# Altium footprint library ACB_PcbLib.PcbLib: 40 footprints (part 3 of 3)
Each footprint in its own frame and in the unit in brackets; x right, y up, seen from the top. Pads: shape width x height; smd on the part's side, far side on the other; paste and mask are expansions set on the pad; w line width, h text height; cw(c..) or ccw(c..) is an arc to the next point about the centre after c.
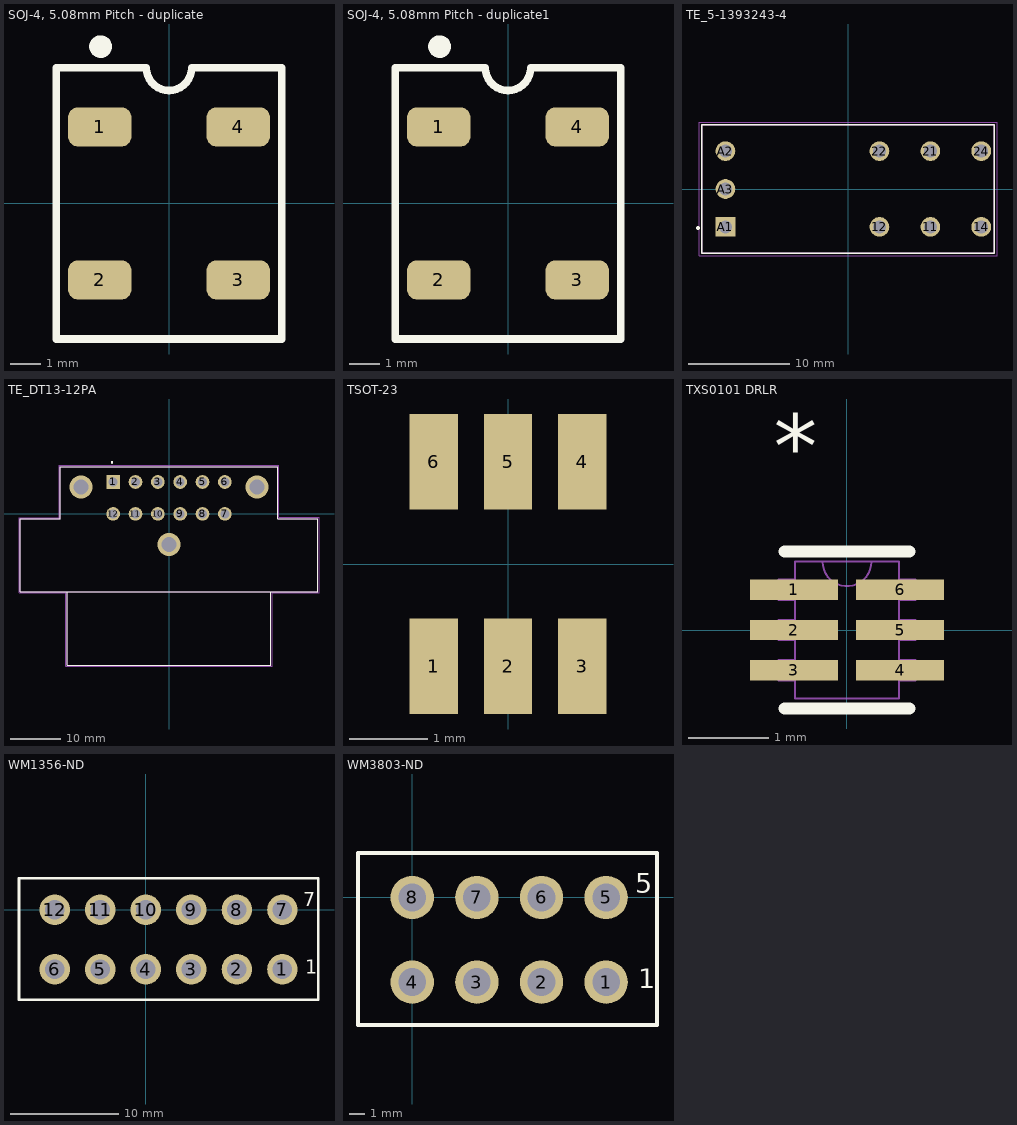
[diagram p2: the footprints below, top view; thin cyan lines are the x and y axes]

## SOJ-4, 5.08mm Pitch - duplicate [mm]
pads (4):
  rrect50% 2.1x1.3 smd: 1(-2.314,2.54) 2(-2.314,-2.54) 3(2.286,-2.54) 4(2.286,2.54)
Top Overlay:
  circle w0.254: c-2.286,5.207 r0.25
  region: -2.54,5.461 -2.54,4.961 -2.04,4.961 -2.04,5.461
  lines w0.25: -0.764,4.5 -3.764,4.5 -3.764,-4.5 3.736,-4.5 3.736,4.5 0.736,4.5
  lines w0.254: -0.764,4.5 ccw(c-0.014,4.5) 0.736,4.5

## SOJ-4, 5.08mm Pitch - duplicate1 [mm]
pads (4):
  rrect50% 2.1x1.3 smd: 1(-2.314,2.54) 2(-2.314,-2.54) 3(2.286,-2.54) 4(2.286,2.54)
Top Overlay:
  circle w0.254: c-2.286,5.207 r0.25
  region: -2.54,5.461 -2.54,4.961 -2.04,4.961 -2.04,5.461
  lines w0.25: -0.764,4.5 -3.764,4.5 -3.764,-4.5 3.736,-4.5 3.736,4.5 0.736,4.5
  lines w0.254: -0.764,4.5 ccw(c-0.014,4.5) 0.736,4.5

## TE_5-1393243-4 [mm]
pads (9):
  round 1.95 hole 1.3: 11(8.15,-3.75) 12(3.11,-3.75) 14(13.19,-3.75) 21(8.15,3.75) 22(3.11,3.75) 24(13.19,3.75) A2(-12.15,3.75) A3(-12.15,0)
  rect 1.95x1.95 hole 1.3: A1(-12.15,-3.75)
Top Overlay:
  circle w0.2: c-14.865,-3.87 r0.1
  lines w0.127: -14.5,-6.35 -14.5,6.35 14.5,6.35 14.5,-6.35 -14.5,-6.35
Mechanical 4:
  lines w0.127: -14.5,-6.35 -14.5,6.35 ; -14.5,-6.35 14.5,-6.35 ; -14.5,-6.35 -14.5,6.35 ; -14.5,-6.35 14.5,-6.35 ; -14.5,6.35 14.5,6.35 ; -14.5,6.35 14.5,6.35 ; 14.5,-6.35 14.5,6.35 ; 14.5,-6.35 14.5,6.35
Mechanical 16:
  lines w0.05: -14.75,-6.6 -14.75,6.6 14.75,6.6 14.75,-6.6 -14.75,-6.6
3D body: height 15.7, standoff 0, extent -14.5,-6.325 14.475,6.325

## TE_DT13-12PA [mm]
pads (12):
  rect 2.715x2.715 hole 1.81: 1(-11.115,6.35)
  round 2.715 hole 1.81: 2(-6.67,6.35) 3(-2.225,6.35) 4(2.225,6.35) 5(6.67,6.35) 6(11.115,6.35) 7(11.115,0) 8(6.67,0) 9(2.225,0) 10(-2.225,0) 11(-6.67,0) 12(-11.115,0)
via -17.54,5.34 diameter 4.572 hole 2.99
via 17.54,5.34 diameter 4.572 hole 2.99
via 0,-6.1 diameter 4.572 hole 2.99
Top Overlay:
  circle w0.2: c-11.35,10.25 r0.158
  lines w0.127: -20.28,-15.49 20.28,-15.49 ; -20.28,-15.49 -29.605,-15.49 -29.605,-1 -21.605,-1 -21.605,9.4 21.605,9.4 21.605,-1 29.605,-1 29.605,-15.49 20.28,-15.49 ; -20.28,-15.49 -20.28,-30.1 20.28,-30.1 20.28,-15.49
Mechanical 4:
  lines w0.127: -29.605,-15.49 -20.28,-15.49 ; -29.605,-15.49 -29.605,-1 ; -29.605,-15.49 -20.28,-15.49 ; -29.605,-15.49 -29.605,-1 ; -29.605,-1 -21.605,-1 ; -29.605,-1 -21.605,-1 ; -21.605,-1 -21.605,9.4 ; -21.605,-1 -21.605,9.4 ; -21.605,9.4 21.605,9.4 ; -21.605,9.4 21.605,9.4 ; -20.28,-30.1 -20.28,-15.49 ; -20.28,-30.1 20.28,-30.1 ; -20.28,-30.1 -20.28,-15.49 ; -20.28,-30.1 20.28,-30.1 ; -20.28,-15.49 20.28,-15.49 ; -20.28,-15.49 20.28,-15.49 ; 20.28,-30.1 20.28,-15.49 ; 20.28,-30.1 20.28,-15.49 ; 20.28,-15.49 29.605,-15.49 ; 20.28,-15.49 29.605,-15.49 ; 21.605,-1 21.605,9.4 ; 21.605,-1 29.605,-1 ; 21.605,-1 21.605,9.4 ; 21.605,-1 29.605,-1 ; 29.605,-15.49 29.605,-1 ; 29.605,-15.49 29.605,-1
Mechanical 16:
  lines w0.05: -29.855,-15.74 -20.53,-15.74 -20.53,-30.35 20.53,-30.35 20.53,-15.74 29.855,-15.74 29.855,-0.7 21.85,-0.7 21.85,9.65 -21.85,9.65 -21.85,-0.75 -29.855,-0.75 -29.855,-15.74
3D body "c-dt13-12pa-g003-99-3d.stp": height 35.41, standoff -3.17, extent -29.632,-30.074 29.575,9.423

## TSOT-23 [mm]
pads (6):
  rect 0.62x1.22 smd: 1(-0.95,-1.31) 2(0,-1.31) 3(0.95,-1.31) 4(0.95,1.31) 5(0,1.31) 6(-0.95,1.31)
3D body: height 1, standoff 0, extent -1.45,-0.85 1.45,0.85

## TXS0101 DRLR [mil]
pads (6):
  rect 43x10 smd: 1(-26,19.68) 2(-26,0) 3(-26,-19.68) 4(26,-19.68) 5(26,0) 6(26,19.68)
Top Overlay:
  lines w6: -30.5,-38.5 30.5,-38.5 ; -30.5,38.5 30.5,38.5
  text "*" at -36,74.69 h31.25
Mechanical 1:
  lines w1: -12,33.5 ccw(c0,33.5) 12,33.5 ; -33.5,-24.68 -25.5,-24.68 -25.5,-14.69 -33.5,-14.69 -33.5,-24.68 ; -33.5,-5 -25.5,-5 -25.5,5 -33.5,5 -33.5,-5 ; -33.5,14.69 -25.5,14.69 -25.5,24.68 -33.5,24.68 -33.5,14.69 ; -25.5,-33.5 -25.5,33.5 25.5,33.5 25.5,-33.5 -25.5,-33.5 ; 25.5,-24.68 33.5,-24.68 33.5,-14.69 25.5,-14.69 25.5,-24.68 ; 25.5,-5 33.5,-5 33.5,5 25.5,5 25.5,-5 ; 25.5,14.69 33.5,14.69 33.5,24.68 25.5,24.68 25.5,14.69
  text "*" at -10.5,30.5 h31.25

## WM1356-ND [mm]
pads (12):
  round 2.819 hole 1.8: 1(12.6,-5.5) 2(8.4,-5.5) 3(4.2,-5.5) 4(0,-5.5) 5(-4.2,-5.5) 6(-8.4,-5.5) 7(12.6,0) 8(8.4,0) 9(4.2,0) 10(0,0) 11(-4.2,0) 12(-8.4,0)
Top Overlay:
  lines w0.254: -11.7,-8.3 -11.7,2.9 15.9,2.9 15.9,-8.3 -11.7,-8.3
  text "1" at 14.7,-5.9 h1.27
  text "7" at 14.5,0.3 h1.27
3D body "039281123.stp": height 12.8, standoff -3.5, extent -11.5,-7.7 15.7,3.3

## WM3803-ND [mm]
pads (8):
  round 2.819 hole 1.8: 1(12.6,-5.5) 2(8.4,-5.5) 3(4.2,-5.5) 4(0,-5.5) 5(12.6,0) 6(8.4,0) 7(4.2,0) 8(0,0)
Top Overlay:
  lines w0.254: -3.525,-8.3 -3.525,2.9 15.9,2.9 15.9,-8.3 -3.525,-8.3
  text "5" at 14.5,0.3 h1.27
  text "1" at 14.7,-5.9 h1.27
3D body "039281083.stp": height 12.8, standoff -3.5, extent -3.225,-7.925 15.575,3.075